# Altium schematic symbol library FET.SchLib: 40 symbols
Pins are listed as number, name and electrical type; pins without a type are passive.

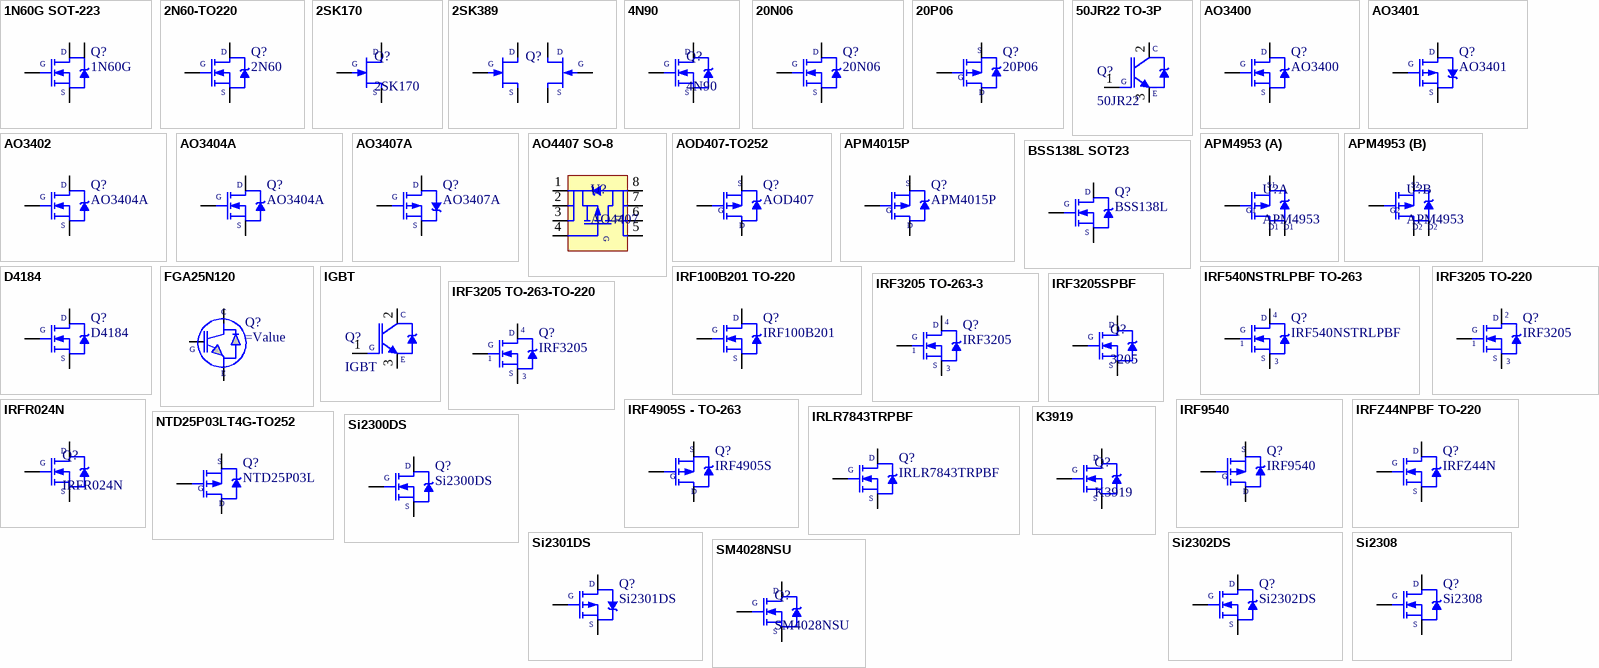
[diagram p0: symbols 1N60G SOT-223 to SM4028NSU]

## 1N60G SOT-223
designator Q?, comment 1N60G
N−Channel 600V,1A ,VGS=30V, Rds=11R; Designed by: TranLuyen; Code: N/A; LCSC Part: C347324
footprint SOT223-4N (SOT223, 4-Leads, Body 6.5x3.5mm, Pitch 2.3mm, Lead Span 7mm, IPC Medium Density)
pins: 1 G, 2 D, 3 S, 4 D

## 2N60-TO220
designator Q?, comment 2N60
600V N Channel Power MOSFET; Code: N/A; ComponentLink1Description: Datasheet
footprint QTO-220 (TO-220 - 1-2-3)
pins: 1 G, 2 D, 3 S

## 2SK170
designator Q?
N channel JFET -Low Noise Audio Amplifier Applications; Code: N/A
footprint QTO-92 (TO-92)
pins: 1 D, 2 G, 3 S

## 2SK389
designator Q?
N channel JFET -Low Noise Audio Amplifier Applications; Code: N/A
footprint 2SK389
pins: 1 D, 2 G, 3 S, 5 S, 6 G, 7 D

## 4N90
designator Q?
N-Channel QFET® MOSFET 900 V, 4.0 A; Designed by: TranLuyen; Code: N/A
footprint QTO-220 (TO-220 - 1-2-3)
footprint QTO-220-sole (TO-220 - 1-2-3)
pins: 1 G, 2 D, 3 S

## 20N06
designator Q?
N−Channel DPAK / ,60V - 20A, Rds = 175m Ohm; Code: N/A
footprint TO-252 (KVU D-PAK, 3-Pads, Body 6,2x6,7mm (max), IPC Medium Density)
pins: 1 G, 2 D, 3 S

## 20P06
designator Q?
P−Channel DPAK / ,60V - 20A, Rds = 175m Ohm; Code: N/A
footprint TO-252 (KVU D-PAK, 3-Pads, Body 6,2x6,7mm (max), IPC Medium Density)
pins: 1 G, 2 D, 3 S

## 50JR22 TO-3P
designator Q?, comment 50JR22
Silicon N-Channel IGBT 600V 50A; Designed by: TranLuyen; Code: N/A
footprint TO247_3 (TO247, TO-247, TO-3P pitch: 5.5mm 16x5mm, TO-218)
pins: 1 G, 2 D, 3 S
text: C; E

## AO3400
designator Q?
N-Channel 1.4W, Vds = 30V, Vgs = +-12V, Id = 4.9A; Code: 1901-0360; Designed by: Nhox
footprint SOT23_N NXP (SOT23, 3-Leads, Body 3x1.4mm, Pitch 0.95mm, IPC Medium Density)
pins: 1 G, 2 S, 3 D

## AO3401
designator Q?
AO3402 30V P-Channel MOSFET; Code: N/A
footprint SOT23_N NXP (SOT23, 3-Leads, Body 3x1.4mm, Pitch 0.95mm, IPC Medium Density)
pins: 1 G, 2 S, 3 D

## AO3402
designator Q?, comment AO3404A
30V N-Channel MOSFET 4A; Value: AO3404A; Code: N/A
footprint SOT23_N NXP (SOT23, 3-Leads, Body 3x1.4mm, Pitch 0.95mm, IPC Medium Density)
pins: 1 G, 2 S, 3 D

## AO3404A
designator Q?
MOSFET N-CH 30V 5A SOT23-3; Value: AO3404A; Code: N/A
footprint SOT23_N NXP (SOT23, 3-Leads, Body 3x1.4mm, Pitch 0.95mm, IPC Medium Density)
pins: 1 G, 2 S, 3 D

## AO3407A
designator Q?
P-Channel 30V 4.1A,  VGS = 20V, SOT-23-3; Code: N/A
footprint SOT23_N NXP (SOT23, 3-Leads, Body 3x1.4mm, Pitch 0.95mm, IPC Medium Density)
pins: 1 G, 2 S, 3 D

## AO4407 SO-8
designator U?, comment AO4407
VDS -30V P-Channel, -12A; Code: 1901-088
footprint SO_8 (SOP-8, 5x3.9mm body 1.27mm pitch, SOT96-1, M08A, S8, SOIC8, VO8, MS-012AA(JEDEC), R-8, 8S2, VOG8)
pins: 1 S, 2 S, 3 S, 4 G, 5 D, 6 D, 7 D, 8 D

## AOD407-TO252
designator Q?, comment AOD407
Trans MOSFET P-CH 60V 12A 3-Pin(2+Tab) DPAK T/R; Code: 1901-084
footprint TO-252 (KVU D-PAK, 3-Pads, Body 6,2x6,7mm (max), IPC Medium Density)
pins: 1 G, 2 D, 3 S

## APM4015P
designator Q?
APM4015P, Vgs = -4.5V Rds = 19mOhm, Vgs = -10V Rds = 13mOhm, Vds = -40V, Id = -45A, Rja = 50°C; Code: 1901-0333; Designed by: Nhox
footprint TO-252 (KVU D-PAK, 3-Pads, Body 6,2x6,7mm (max), IPC Medium Density)
pins: 1 G, 2 D, 3 S

## APM4953
designator U?
Dual P-Channel Enhancement Mode Mosfet -30V/-4.9A; Code: 1901-017; Designed by: TranLuyen
footprint SO_8 (SOP-8, 5x3.9mm body 1.27mm pitch, SOT96-1, M08A, S8, SOIC8, VO8, MS-012AA(JEDEC), R-8, 8S2, VOG8)
part A pins: 1 S1, 2 G1, 7 D1, 8 D1
part B pins: 3 S2, 4 G2, 5 D2, 6 D2

## BSS138L SOT23
designator Q?, comment BSS138L
Power MOSFET 200 mA, 50V, N−Channel SOT23; Code: 1901-076; Value: BSS138L
footprint SOT23_N NXP (SOT23, 3-Leads, Body 3x1.4mm, Pitch 0.95mm, IPC Medium Density)
pins: 1 G, 2 S, 3 D

## D4184
designator Q?
50A 40V N-Channel MOSFET. VGS=20V; Code: 1901-0345
footprint TO-252 (KVU D-PAK, 3-Pads, Body 6,2x6,7mm (max), IPC Medium Density)
pins: 1 G, 2 D, 3 S

## FGA25N120
designator Q?
1200 V, 25 A NPT Trench IGBT; Code: N/A
footprint QTO-220 mod BC557 (TO-220 - 1-2-3)
pins: 1 G, 2 S, 3 D
text: C; E

## IGBT
designator Q?
Designed by: TranLuyen; Code: N/A
footprint TO247_3 (TO247, TO-247, TO-3P pitch: 5.5mm 16x5mm, TO-218)
pins: 1 G, 2 D, 3 S
text: C; E

## IRF100B201 TO-220
designator Q?, comment IRF100B201
MOSFET N - CHANNEL; Code: N/A
footprint QTO-220 (TO-220 - 1-2-3)
footprint QTO-220H3 (TO-220 1-2-3)
footprint QTO-220 25x24x16 (TO-220 25x24x16)
pins: 1 G, 2 D, 3 S

## IRF540NSTRLPBF TO-263
designator Q?, comment IRF540NSTRLPBF
IRF540NSTRLPBF MOSFET CHANNEL N 100V 33A TO-263-3; Value: IRF3205
footprint TO-263-3_MFG
footprint TO-263-3_MFG - VIA
pins: 1 G, 3 S, 4 D

## IRF3205 TO-220
designator Q?, comment IRF3205
MOSFET N - CHANNEL; Value: IRF3205; Code: N/A
footprint QTO-220 (TO-220 - 1-2-3)
footprint QTO-220H3 (TO-220 1-2-3)
pins: 1 G, 2 D, 3 S

## IRF3205 TO-263-3
designator Q?, comment IRF3205
MOSFET N - CHANNEL; Code: 1901-073; Value: IRF3205
footprint TO-263-3_MFG
footprint TO-263-3_MFG - VIA
pins: 1 G, 3 S, 4 D

## IRF3205 TO-263-TO-220
designator Q?, comment IRF3205
MOSFET N - CHANNEL; Code: 1901-073-N/A; Value: IRF3205
footprint TO-220-TO-263-3
pins: 1 G, 3 S, 4 D

## IRF3205SPBF
designator Q?, comment 3205
N-channel 55V - 110A - D2PAK; Code: 1901-0363; Designed by: Nhox
footprint TO-263
footprint TO-263 - Via
pins: 1 G, 2 D, 3 S

## IRF4905S - TO-263
designator Q?, comment IRF4905S
Trans MOSFET P-CH 55V 74A 3-Pin; Code: 1901-043
footprint TO-263
pins: 1 G, 2 D, 3 S

## IRF9540
designator Q?
P-Channel, Vds = -100V, Vgs = +-20V; Code: 1901-048; Value: IRF9540
footprint QTO-220H3 (TO-220 1-2-3)
footprint QTO-220 25x24x16 (TO-220 25x24x16)
pins: 1 G, 2 D, 3 S

## IRFR024N
designator Q?
N-channel 60V - 0.1Ω - 14A - DPAK; Designed by: Nhox; Code: N/A
footprint TO-252 (KVU D-PAK, 3-Pads, Body 6,2x6,7mm (max), IPC Medium Density)
pins: 1 G, 2 D, 3 S

## IRFZ44NPBF TO-220
designator Q?, comment IRFZ44N
MOSFET N - CHANNEL; Code: 1901-0346
footprint QTO-220 (TO-220 - 1-2-3)
footprint QTO-220H3 (TO-220 1-2-3)
pins: 1 G, 2 D, 3 S

## IRLR7843TRPBF
designator Q?
IRLR7843TRPBF MOSFET Channel N 30V 161A TO-252-3; Code: N/A
footprint TO-252 (KVU D-PAK, 3-Pads, Body 6,2x6,7mm (max), IPC Medium Density)
pins: 1 G, 2 D, 3 S

## K3919
designator Q?
RDS(on)1 = 5.6 mΩ MAX. (VGS = 10 V, ID = 32 A), Vds: 25V, Id max: 64A, Vgs: +-20V; Code: N/A
footprint TO-252 (KVU D-PAK, 3-Pads, Body 6,2x6,7mm (max), IPC Medium Density)
footprint TO-263-2 AND TO-252
pins: 1 G, 2 D, 3 S

## NTD25P03LT4G-TO252
designator Q?, comment NTD25P03L
P-Channel -25 A, VDS -30 V, Vgs 15V; Code: 1901-062; ComponentLink1Description: Datasheet; ComponentLink1URL: https://www.onsemi.com/pdf/datasheet/ntd25p03l-d.pdf
footprint TO-252 (KVU D-PAK, 3-Pads, Body 6,2x6,7mm (max), IPC Medium Density)
pins: 1 G, 2 S, 3 D

## Si2300DS
designator Q?
N-Channel 1.7W, Vds = 30V, Vgs = +-12V, Id = 3A; Code: 1701-079; Value: Si2300DS
footprint SOT23_N NXP (SOT23, 3-Leads, Body 3x1.4mm, Pitch 0.95mm, IPC Medium Density)
pins: 1 G, 2 S, 3 D

## Si2301DS
designator Q?
P-Channel 1.25W, Vds = -20V, Vgs = +-8V, Vgs -4.5V Id = -2.3A, Vgs -2.5V Id = -1.9A; Code: 1901-066; Value: Si2301DS
footprint SOT23_N NXP (SOT23, 3-Leads, Body 3x1.4mm, Pitch 0.95mm, IPC Medium Density)
pins: 1 G, 2 S, 3 D

## Si2302DS
designator Q?
N-Channel 0.6W, Vds = 20V, Vgs = +-8V, Id = 2.9A; Code: 1901-067; Value: Si2302DS
footprint SOT23_N NXP (SOT23, 3-Leads, Body 3x1.4mm, Pitch 0.95mm, IPC Medium Density)
pins: 1 G, 2 S, 3 D

## Si2308
designator Q?
N-Channel 1.66W, Vds = 60V, Vgs = +-20V, Id = 2.3A; Value: Si2308; Code: N/A
footprint SOT23_N NXP (SOT23, 3-Leads, Body 3x1.4mm, Pitch 0.95mm, IPC Medium Density)
pins: 1 G, 2 S, 3 D

## SM4028NSU
designator Q?
N-channel FET 60A 40V SMD TO-252, 60W; Code: 1901-077
footprint TO-252 (KVU D-PAK, 3-Pads, Body 6,2x6,7mm (max), IPC Medium Density)
footprint TO-252-SMT (KVU D-PAK, 3-Pads, Body 6,2x6,7mm (max), IPC Medium Density)
footprint TO-252-SMT2 (KVU D-PAK, 3-Pads, Body 6,2x6,7mm (max), IPC Medium Density)
pins: 1 G, 2 D, 3 S

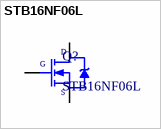
[diagram p1: symbol STB16NF06L]

## STB16NF06L
designator Q?
N-channel 60V - 0.07Ω - 16A - D2PAK; Code: 1901-0359; Designed by: Nhox
footprint TO-263
footprint TO-263 - Via
pins: 1 G, 2 D, 3 S